# EAGLE library part 3BY5PINS (library F-E library custom components)
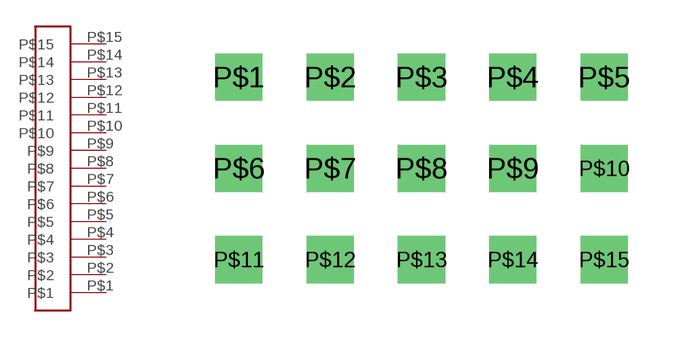
[diagram p2: symbol with the pads of 3BY5PINS; footprint 3BY5PINS]

Designator prefix -

## 3BY5PINS  [3BY5PINS]
P$1  P$1
P$2  P$2
P$3  P$3
P$4  P$4
P$5  P$5
P$6  P$6
P$7  P$7
P$8  P$8
P$9  P$9
P$10  P$10
P$11  P$11
P$12  P$12
P$13  P$13
P$14  P$14
P$15  P$15

## Footprint 3BY5PINS (pad centres in mm)
drill 0.8 square: P$1 1.27,6.35; P$2 3.81,6.35; P$3 6.35,6.35; P$4 8.89,6.35; P$5 11.43,6.35; P$6 1.27,3.81; P$7 3.81,3.81; P$8 6.35,3.81; P$9 8.89,3.81; P$10 11.43,3.81; P$11 1.27,1.27; P$12 3.81,1.27; P$13 6.35,1.27; P$14 8.89,1.27; P$15 11.43,1.27